# Altium footprint library avr32da32_evalboard_PCBLib.PcbLib: 4 footprints
Each footprint in its own frame and in the unit in brackets; x right, y up, seen from the top. Pads: shape width x height; smd on the part's side, far side on the other; paste and mask are expansions set on the pad; w line width, h text height; cw(c..) or ccw(c..) is an arc to the next point about the centre after c.
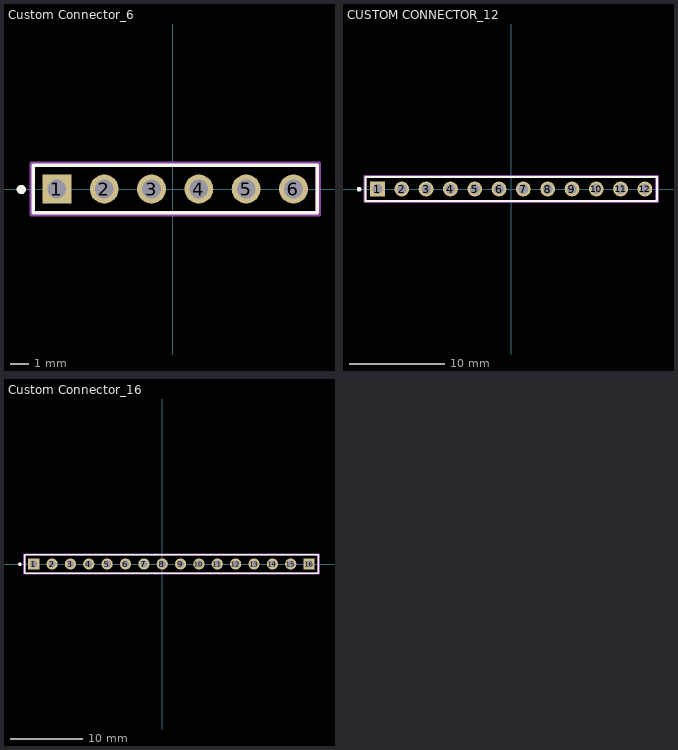
[diagram p0: the footprints below, top view; thin cyan lines are the x and y axes]

## Custom Connector_6 [mm] "Board Connector, 6 Contact(s), 1 Row(s), Male, Straight, 0.1 inch Pitch, Solder Terminal, Black Insulator, Receptacle"
pads (6):
  rect 1.55x1.55 hole 1 paste-2539.97 mask+0: 1(-6.223,0)
  round 1.55 hole 1 paste-2539.97 mask+0: 2(-3.683,0) 3(-1.143,0) 5(3.937,0) 6(6.477,0)
  round 1.55 hole 1 paste-2539.97 mask-2539.97: 4(1.397,0)
Top Overlay:
  circle w0.25: c-8.133,-0.025 r0.125
  lines w0.2: -7.493,-1.27 -7.493,1.27 0.127,1.27 7.747,1.27 7.747,-1.27 0.127,-1.27 -7.493,-1.27
Top Solder:
  circle w0.775: c1.397,0 r0.387
Bottom Solder:
  circle w0.775: c1.397,0 r0.387
Top Assembly:
  lines w0.2: 0.027,-1.37 7.847,-1.37 7.847,1.37 0.027,1.37 ; 0.227,-1.37 -7.593,-1.37 -7.593,1.37 0.227,1.37
  text ".Designator" at -3.556,1.839 h1
Top 3D Body:
  lines w0.2: -7.493,-1.27 -7.493,1.27 0.127,1.27 7.747,1.27 7.747,-1.27 0.127,-1.27 -7.493,-1.27
Top Courtyard:
  lines w0.2: 0.027,-1.37 7.847,-1.37 7.847,1.37 0.027,1.37 ; 0.227,-1.37 -7.593,-1.37 -7.593,1.37 0.227,1.37
Top Component Center:
  lines w0.1: -4.183,0 -3.183,0 ; -3.683,-0.5 -3.683,0.5 ; 3.437,0 4.437,0 ; 3.937,-0.5 3.937,0.5
3D body "Conn_Molex_90120-0763_eec.STEP": height 0.25, standoff 0, extent -7.593,-1.37 0.227,1.37
3D body "Conn_Molex_90120-0763_eec.STEP": height 0.25, standoff 0, extent 0.027,-1.37 7.847,1.37

## CUSTOM CONNECTOR_12 [mm]
pads (12):
  rect 1.55x1.55 hole 1 paste-2539.97 mask+0: 1(-13.97,0)
  round 1.55 hole 1 paste-2539.97 mask+0: 2(-11.43,0) 3(-8.89,0) 5(-3.81,0) 6(-1.27,0) 7(1.27,0) 8(3.81,0) 9(6.35,0) 11(11.43,0) 12(13.97,0)
  round 1.55 hole 1 paste-2539.97 mask-2539.97: 4(-6.35,0) 10(8.89,0)
Top Overlay:
  circle w0.25: c-15.88,-0.025 r0.125
  lines w0.2: 15.24,-1.27 7.62,-1.27 0,-1.27 -7.62,-1.27 -15.24,-1.27 -15.24,1.27 -7.62,1.27 0,1.27 7.62,1.27 15.24,1.27 ; 15.24,-1.27 15.24,1.27 ; 15.24,-1.27 15.24,1.27
Top Solder:
  circle w0.775: c8.89,0 r0.387
  circle w0.775: c-6.35,0 r0.387
Bottom Solder:
  circle w0.775: c8.89,0 r0.387
  circle w0.775: c-6.35,0 r0.387
Top Assembly:
  lines w0.2: -7.72,-1.37 0.1,-1.37 ; -7.72,1.37 0.1,1.37 ; -7.52,-1.37 -15.34,-1.37 -15.34,1.37 -7.52,1.37 ; -0.1,-1.37 7.72,-1.37 ; -0.1,1.37 7.72,1.37 ; 7.52,-1.37 15.34,-1.37 15.34,1.37 7.52,1.37 ; 15.14,-1.37 15.14,1.37
  text ".Designator" at -3.302,2.347 h1
Top 3D Body:
  lines w0.2: 15.24,-1.27 7.62,-1.27 0,-1.27 -7.62,-1.27 -15.24,-1.27 -15.24,1.27 -7.62,1.27 0,1.27 7.62,1.27 15.24,1.27 ; 15.24,-1.27 15.24,1.27 ; 15.24,-1.27 15.24,1.27
Top Courtyard:
  lines w0.2: -7.72,-1.37 0.1,-1.37 ; -7.72,1.37 0.1,1.37 ; -7.52,-1.37 -15.34,-1.37 -15.34,1.37 -7.52,1.37 ; -0.1,-1.37 7.72,-1.37 ; -0.1,1.37 7.72,1.37 ; 7.52,-1.37 15.34,-1.37 15.34,1.37 7.52,1.37 ; 15.14,-1.37 15.14,1.37
Top Component Center:
  lines w0.1: -11.93,0 -10.93,0 ; -11.43,-0.5 -11.43,0.5 ; -4.31,0 -3.31,0 ; -3.81,-0.5 -3.81,0.5 ; 3.31,0 4.31,0 ; 3.81,-0.5 3.81,0.5 ; 10.93,0 11.93,0 ; 11.43,-0.5 11.43,0.5
3D body "Conn_Molex_90120-0763_eec.STEP": height 0.25, standoff 0, extent 7.52,-1.37 15.34,1.37
3D body "Conn_Molex_90120-0763_eec.STEP": height 0.25, standoff 0, extent -0.1,-1.37 7.72,1.37
3D body "Conn_Molex_90120-0763_eec.STEP": height 0.25, standoff 0, extent -7.72,-1.37 0.1,1.37
3D body "Conn_Molex_90120-0763_eec.STEP": height 0.25, standoff 0, extent -15.34,-1.37 -7.52,1.37

## Custom Connector_16 [mm]
pads (16):
  rect 1.55x1.55 hole 1 paste-2539.97 mask+0: 1(-17.78,0) 16(20.32,0)
  round 1.55 hole 1 paste-2539.97 mask+0: 2(-15.24,0) 3(-12.7,0) 5(-7.62,0) 6(-5.08,0) 7(-2.54,0) 8(0,0) 9(2.54,0) 11(7.62,0) 12(10.16,0) 13(12.7,0) 14(15.24,0) 15(17.78,0)
  round 1.55 hole 1 paste-2539.97 mask-2539.97: 4(-10.16,0) 10(5.08,0)
Top Overlay:
  circle w0.25: c-19.69,-0.025 r0.125
  lines w0.2: 13.97,-1.27 21.59,-1.27 21.59,1.27 13.97,1.27 ; 19.05,-1.27 11.43,-1.27 3.81,-1.27 -3.81,-1.27 -11.43,-1.27 -19.05,-1.27 -19.05,1.27 -11.43,1.27 -3.81,1.27 3.81,1.27 11.43,1.27 19.05,1.27
Top Solder:
  circle w0.775: c-10.16,0 r0.387
  circle w0.775: c5.08,0 r0.387
Bottom Solder:
  circle w0.775: c-10.16,0 r0.387
  circle w0.775: c5.08,0 r0.387
Top Assembly:
  lines w0.2: -11.53,-1.37 -3.71,-1.37 ; -11.53,1.37 -3.71,1.37 ; -11.33,-1.37 -19.15,-1.37 -19.15,1.37 -11.33,1.37 ; -3.91,-1.37 3.91,-1.37 ; -3.91,1.37 3.91,1.37 ; 3.71,-1.37 11.53,-1.37 ; 3.71,1.37 11.53,1.37 ; 11.33,-1.37 19.15,-1.37 ; 11.33,1.37 19.15,1.37 ; 13.87,-1.37 21.69,-1.37 21.69,1.37 13.87,1.37
  text ".Designator" at -7.112,2.347 h1
Top 3D Body:
  lines w0.2: 13.97,-1.27 21.59,-1.27 21.59,1.27 13.97,1.27 ; 19.05,-1.27 11.43,-1.27 3.81,-1.27 -3.81,-1.27 -11.43,-1.27 -19.05,-1.27 -19.05,1.27 -11.43,1.27 -3.81,1.27 3.81,1.27 11.43,1.27 19.05,1.27
Top Courtyard:
  lines w0.2: -11.53,-1.37 -3.71,-1.37 ; -11.53,1.37 -3.71,1.37 ; -11.33,-1.37 -19.15,-1.37 -19.15,1.37 -11.33,1.37 ; -3.91,-1.37 3.91,-1.37 ; -3.91,1.37 3.91,1.37 ; 3.71,-1.37 11.53,-1.37 ; 3.71,1.37 11.53,1.37 ; 11.33,-1.37 19.15,-1.37 ; 11.33,1.37 19.15,1.37 ; 13.87,-1.37 21.69,-1.37 21.69,1.37 13.87,1.37
Top Component Center:
  lines w0.1: -15.74,0 -14.74,0 ; -15.24,-0.5 -15.24,0.5 ; -8.12,0 -7.12,0 ; -7.62,-0.5 -7.62,0.5 ; -0.5,0 0.5,0 ; 0,-0.5 0,0.5 ; 7.12,0 8.12,0 ; 7.62,-0.5 7.62,0.5 ; 14.74,0 15.74,0 ; 15.24,-0.5 15.24,0.5
3D body "Conn_Molex_90120-0763_eec.STEP": height 0.25, standoff 0, extent 11.33,-1.37 19.15,1.37
3D body "Conn_Molex_90120-0763_eec.STEP": height 0.25, standoff 0, extent -19.15,-1.37 -11.33,1.37
3D body "Conn_Molex_90120-0763_eec.STEP": height 0.25, standoff 0, extent -11.53,-1.37 -3.71,1.37
3D body "Conn_Molex_90120-0763_eec.STEP": height 0.25, standoff 0, extent -3.91,-1.37 3.91,1.37
3D body "Conn_Molex_90120-0763_eec.STEP": height 0.25, standoff 0, extent 3.71,-1.37 11.53,1.37

## PCBComponent_1 [mm]